# Altium schematic symbol library BU03.SchLib: 1 symbol
Pins are listed as number, name and electrical type; pins without a type are passive.

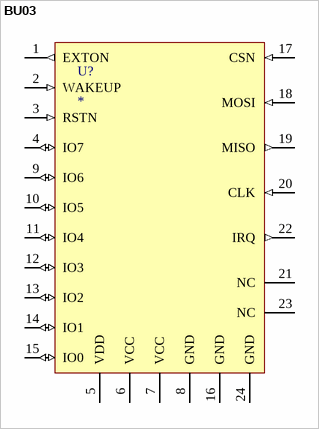
[diagram p0: symbol BU03]

## BU03
designator U?
footprint BU03-MODE-24PIN-T
pins: 1 EXTON (out), 2 WAKEUP (in), 3 RSTN (in), 4 IO7 (io), 5 VDD (power), 6 VCC (power), 7 VCC (power), 8 GND (power), 9 IO6 (io), 10 IO5 (io), 11 IO4 (io), 12 IO3 (io), 13 IO2 (io), 14 IO1 (io), 15 IO0 (io), 16 GND (power), 17 CSN (in), 18 MOSI (in), 19 MISO (out), 20 CLK (in), 21 NC, 22 IRQ (out), 23 NC, 24 GND (power)